# Altium schematic symbol library Schlib1.SchLib: 6 symbols
Pins are listed as number, name and electrical type; pins without a type are passive.

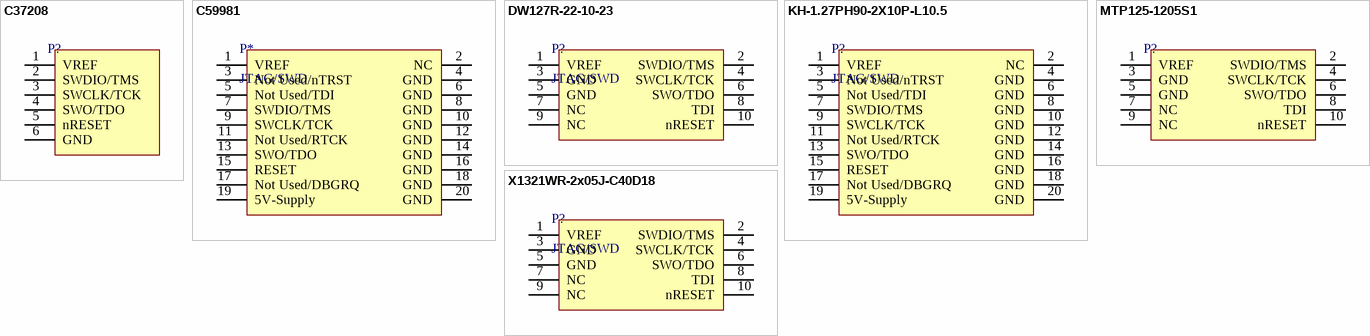
[diagram p0: symbols C37208 to X1321WR-2x05J-C40D18]

## C37208
designator P?
2.54mm_6pin_singlerow
footprint 2.54mm_6pin_singlerow
pins: 1 VREF, 2 SWDIO/TMS, 3 SWCLK/TCK, 4 SWO/TDO, 5 nRESET, 6 GND

## C59981
designator P*, comment JTAG/SWD
1.27mm_20pin_dualrow_VH
footprint 1.27mm_20pin_dualrow_VH
pins: 1 VREF, 2 NC, 3 Not Used/nTRST, 4 GND, 5 Not Used/TDI, 6 GND, 7 SWDIO/TMS, 8 GND, 9 SWCLK/TCK, 10 GND, 11 Not Used/RTCK, 12 GND, 13 SWO/TDO, 14 GND, 15 RESET, 16 GND, 17 Not Used/DBGRQ, 18 GND, 19 5V-Supply, 20 GND

## DW127R-22-10-23
designator P?, comment JTAG/SWD
1.27mm_10pin_dualrow_VH
footprint 1.27mm_10pin_dualrow_VH
pins: 1 VREF, 2 SWDIO/TMS, 3 GND, 4 SWCLK/TCK, 5 GND, 6 SWO/TDO, 7 NC, 8 TDI, 9 NC, 10 nRESET

## KH-1.27PH90-2X10P-L10.5
designator P?, comment JTAG/SWD
1.27mm_20pin_dualrow_RH
footprint 1.27mm_20pin_dualrow_RH
pins: 1 VREF, 2 NC, 3 Not Used/nTRST, 4 GND, 5 Not Used/TDI, 6 GND, 7 SWDIO/TMS, 8 GND, 9 SWCLK/TCK, 10 GND, 11 Not Used/RTCK, 12 GND, 13 SWO/TDO, 14 GND, 15 RESET, 16 GND, 17 Not Used/DBGRQ, 18 GND, 19 5V-Supply, 20 GND

## MTP125-1205S1
designator P?
2.54mm_10pin_dualrow
footprint 2.54mm_10pin_dualrow
pins: 1 VREF, 2 SWDIO/TMS, 3 GND, 4 SWCLK/TCK, 5 GND, 6 SWO/TDO, 7 NC, 8 TDI, 9 NC, 10 nRESET

## X1321WR-2x05J-C40D18
designator P?, comment JTAG/SWD
1.27mm_10pin_dualrow_RH
footprint 1.27mm_10pin_dualrow_RH
pins: 1 VREF, 2 SWDIO/TMS, 3 GND, 4 SWCLK/TCK, 5 GND, 6 SWO/TDO, 7 NC, 8 TDI, 9 NC, 10 nRESET